# Altium footprint library Connectors.PcbLib: 228 footprints (part 9 of 15)
Each footprint in its own frame and in the unit in brackets; x right, y up, seen from the top. Pads: shape width x height; smd on the part's side, far side on the other; paste and mask are expansions set on the pad; w line width, h text height; cw(c..) or ccw(c..) is an arc to the next point about the centre after c.
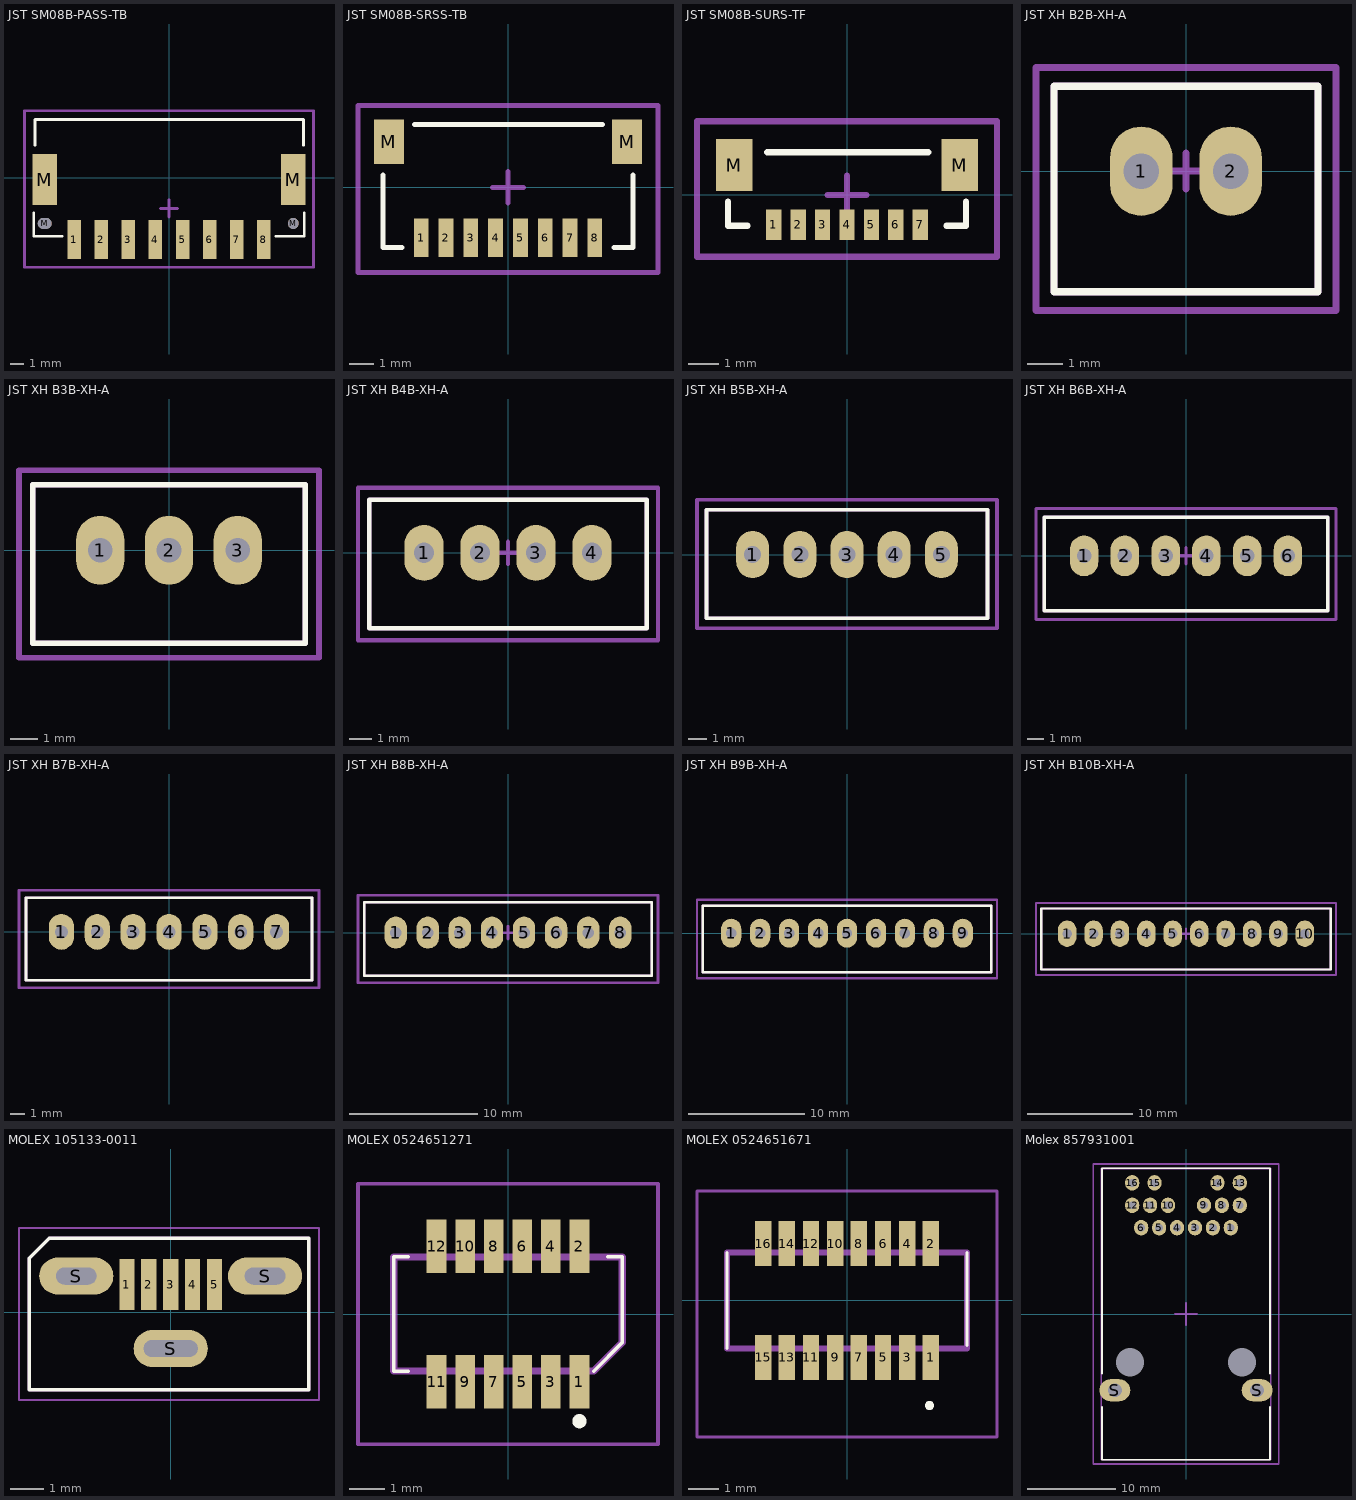
[diagram p8: the footprints below, top view; thin cyan lines are the x and y axes]

## JST SM08B-PASS-TB [mm] "JST PA Series 2mm pitch, side entry connector"
height 5.7
pads (12):
  rect 1x2.9 smd: 1(-7,-4.575) 2(-5,-4.575) 3(-3,-4.575) 4(-1,-4.575) 5(1,-4.575) 6(3,-4.575) 7(5,-4.575) 8(7,-4.575)
  oval 1x0.8 hole 0.8 slot 1 at 0 deg unplated mask+0.102: M(-9.2,-3.375)
  rect 1.8x3.8 smd: M(-9.2,-0.125) M(9.2,-0.125)
  round 0.8 hole 0.8 unplated mask+0.102: M(9.2,-3.375)
Top Overlay:
  lines w0.2: -10,-2.575 -10,-4.325 -7.905,-4.325 ; -9.921,2.41 -9.921,4.315 9.953,4.315 9.953,2.41 ; 7.905,-4.325 10,-4.325 10,-2.575
Top Courtyard:
  lines w0.2: -0.635,-2.265 0.635,-2.265 ; 0,-2.9 0,-1.63 ; -10.699,-6.607 -10.699,4.953 10.699,4.953 10.699,-6.607 -10.699,-6.607
3D body "JST SM08B-PASS-TB.STEP": height 5.8, standoff 0, extent -10,-5.641 10,4.359

## JST SM08B-SRSS-TB [mm] "1.0mm pitch/Disconnectable Crimp style connector"
height 2.95
pads (10):
  rect 0.6x1.55 smd: 1(-3.5,-2.032) 2(-2.5,-2.032) 3(-1.5,-2.032) 4(-0.5,-2.032) 5(0.5,-2.032) 6(1.5,-2.032) 7(2.5,-2.032) 8(3.5,-2.032)
  rect 1.2x1.8 smd: M(-4.8,1.843) M(4.8,1.843)
Top Overlay:
  lines w0.2: -5.032,0.508 -5.032,-2.413 -4.27,-2.413 ; -3.762,2.54 3.81,2.54 ; 4.27,-2.413 5.032,-2.413 5.032,0.508
Top Courtyard:
  lines w0.2: -0.635,0 0.635,0 ; 0,-0.635 0,0.635 ; -6.048,-3.429 6.048,-3.429 6.048,3.302 -6.048,3.302 -6.048,-3.429
3D body "JST SM08B-SRSS-TB.STEP": height 2.95, standoff -0.01, extent -5,-2.383 5,2.567

## JST SM08B-SURS-TF [mm] "1.0mm pitch/Disconnectable Crimp style connector"
height 2.95
pads (9):
  rect 0.5x1 smd: 1(-2.4,-0.975) 2(-1.6,-0.975) 3(-0.8,-0.975) 4(0,-0.975) 5(0.8,-0.975) 6(1.6,-0.975) 7(2.4,-0.975)
  rect 1.2x1.7 smd: M(-3.7,0.975) M(3.7,0.975)
Top Overlay:
  lines w0.2: -3.905,-0.213 -3.905,-1.016 -3.27,-1.016 ; -2.616,1.397 2.667,1.397 ; 3.27,-1.016 3.905,-1.016 3.905,-0.213
Top Courtyard:
  lines w0.2: -0.635,0 0.635,0 ; 0,-0.635 0,0.635 ; -4.921,-2.032 4.921,-2.032 4.921,2.413 -4.921,2.413 -4.921,-2.032
3D body "JST SM08B-SURS-TF.STEP": height 1.75, standoff 0, extent -4.3,-1.303 4.3,1.397

## JST XH B2B-XH-A [mm]
height 7
pads (2):
  oval 1.75x2.5 hole 1: 1(-1.25,0) 2(1.25,0)
Top Overlay:
  lines w0.2: -3.7,-3.375 -3.7,2.375 3.7,2.375 3.7,-3.375 -3.7,-3.375
Top Component Outline:
  lines w0.2: -3.7,-3.375 3.7,-3.375 3.7,2.375 -3.7,2.375 -3.7,-3.375
Top Courtyard:
  lines w0.2: -0.5,0 0.5,0 ; 0,-0.5 0,0.5 ; -4.2,-3.9 -4.2,2.9 4.2,2.9 4.2,-3.9 -4.2,-3.9
3D body "JST B2B-XH-A.STEP": height 7, standoff -3.4, extent -3.7,-3.375 3.7,2.375

## JST XH B3B-XH-A [mm]
height 7
pads (3):
  oval 1.75x2.5 hole 0.9: 1(-2.5,0) 2(0,0) 3(2.5,0)
Top Overlay:
  lines w0.2: -4.95,-3.375 4.95,-3.375 4.95,2.375 -4.95,2.375 -4.95,-3.375
Board:
  lines w0.2: -4.95,-3.375 -4.95,2.375 4.95,2.375 4.95,-3.375 -4.95,-3.375
Top Courtyard:
  lines w0.2: -0.5,0 0.5,0 ; 0,-0.5 0,0.5 ; -5.45,-3.9 5.45,-3.9 5.45,2.9 -5.45,2.9 -5.45,-3.9
3D body "JST B3B-XH-A.STEP": height 7, standoff -3.4, extent -4.95,-3.375 4.95,2.375

## JST XH B4B-XH-A [mm]
height 7
pads (4):
  oval 1.75x2.5 hole 0.9: 1(-3.75,0) 2(-1.25,0) 3(1.25,0) 4(3.75,0)
Top Overlay:
  lines w0.2: -6.2,-3.375 6.2,-3.375 6.2,2.375 -6.2,2.375 -6.2,-3.375
Board:
  lines w0.2: -6.2,-3.375 -6.2,2.375 6.2,2.375 6.2,-3.375 -6.2,-3.375
Top Courtyard:
  lines w0.2: -0.5,0 0.5,0 ; 0,-0.5 0,0.5 ; -6.7,-3.9 6.7,-3.9 6.7,2.9 -6.7,2.9 -6.7,-3.9
3D body "JST B4B-XH-A.STEP": height 7, standoff -3.4, extent -6.2,-3.375 6.2,2.375

## JST XH B5B-XH-A [mm]
height 7
pads (5):
  oval 1.75x2.5 hole 0.9: 1(-5,0) 2(-2.5,0) 3(0,0) 4(2.5,0) 5(5,0)
Top Overlay:
  lines w0.2: -7.45,-3.375 -7.45,2.375 7.45,2.375 7.45,-3.375 -7.45,-3.375
Board:
  lines w0.2: -7.45,-3.375 7.45,-3.375 7.45,2.375 -7.45,2.375 -7.45,-3.375
Top Courtyard:
  lines w0.2: -0.5,0 0.5,0 ; 0,-0.5 0,0.5 ; -7.95,-3.9 -7.95,2.9 7.95,2.9 7.95,-3.9 -7.95,-3.9
3D body "JST B5B-XH-A.STEP": height 7, standoff -3.4, extent -7.45,-3.375 7.45,2.375

## JST XH B6B-XH-A [mm]
height 7
pads (6):
  oval 1.75x2.5 hole 0.9: 1(-6.25,0) 2(-3.75,0) 3(-1.25,0) 4(1.25,0) 5(3.75,0) 6(6.25,0)
Top Overlay:
  lines w0.2: -8.7,-3.375 -8.7,2.375 8.7,2.375 8.7,-3.375 -8.7,-3.375
Board:
  lines w0.2: -8.7,-3.375 8.7,-3.375 8.7,2.375 -8.7,2.375 -8.7,-3.375
Top Courtyard:
  lines w0.2: -0.5,0 0.5,0 ; 0,-0.5 0,0.5 ; -9.2,-3.9 -9.2,2.9 9.2,2.9 9.2,-3.9 -9.2,-3.9
3D body "JST B6B-XH-A.STEP": height 7, standoff -3.4, extent -8.7,-3.375 8.7,2.375

## JST XH B7B-XH-A [mm]
height 7
pads (7):
  oval 1.75x2.5 hole 0.9: 1(-7.5,0) 2(-5,0) 3(-2.5,0) 4(0,0) 5(2.5,0) 6(5,0) 7(7.5,0)
Top Overlay:
  lines w0.2: -9.95,-3.375 -9.95,2.375 9.95,2.375 9.95,-3.375 -9.95,-3.375
Board:
  lines w0.2: -9.95,-3.375 9.95,-3.375 9.95,2.375 -9.95,2.375 -9.95,-3.375
Top Courtyard:
  lines w0.2: -0.5,0 0.5,0 ; 0,-0.5 0,0.5 ; -10.45,-3.9 -10.45,2.9 10.45,2.9 10.45,-3.9 -10.45,-3.9
3D body "JST B7B-XH-A.STEP": height 7, standoff -3.4, extent -9.95,-3.375 9.95,2.375

## JST XH B8B-XH-A [mm]
height 7
pads (8):
  oval 1.75x2.5 hole 0.9: 1(-8.75,0) 2(-6.25,0) 3(-3.75,0) 4(-1.25,0) 5(1.25,0) 6(3.75,0) 7(6.25,0) 8(8.75,0)
Top Overlay:
  lines w0.2: -11.2,-3.375 11.2,-3.375 11.2,2.375 -11.2,2.375 -11.2,-3.375
Board:
  lines w0.2: -11.2,-3.375 -11.2,2.375 11.2,2.375 11.2,-3.375 -11.2,-3.375
Top Courtyard:
  lines w0.2: -0.5,0 0.5,0 ; 0,-0.5 0,0.5 ; -11.7,-3.9 11.7,-3.9 11.7,2.9 -11.7,2.9 -11.7,-3.9
3D body "JST B8B-XH-A.STEP": height 7, standoff -3.4, extent -11.2,-3.375 11.2,2.375

## JST XH B9B-XH-A [mm]
height 7
pads (9):
  oval 1.75x2.5 hole 0.9: 1(-10,0) 2(-7.5,0) 3(-5,0) 4(-2.5,0) 5(0,0) 6(2.5,0) 7(5,0) 8(7.5,0) 9(10,0)
Top Overlay:
  lines w0.2: -12.45,-3.375 -12.45,2.375 12.45,2.375 12.45,-3.375 -12.45,-3.375
Board:
  lines w0.2: -12.45,-3.375 12.45,-3.375 12.45,2.375 -12.45,2.375 -12.45,-3.375
Top Courtyard:
  lines w0.2: -0.5,0 0.5,0 ; 0,-0.5 0,0.5 ; -12.95,-3.9 -12.95,2.9 12.95,2.9 12.95,-3.9 -12.95,-3.9
3D body "JST B9B-XH-A.STEP": height 7, standoff -3.4, extent -12.45,-3.375 12.45,2.375

## JST XH B10B-XH-A [mm]
height 7
pads (10):
  oval 1.75x2.5 hole 0.9: 1(-11.25,0) 2(-8.75,0) 3(-6.25,0) 4(-3.75,0) 5(-1.25,0) 6(1.25,0) 7(3.75,0) 8(6.25,0) 9(8.75,0) 10(11.25,0)
Top Overlay:
  lines w0.2: -13.7,-3.375 13.7,-3.375 13.7,2.375 -13.7,2.375 -13.7,-3.375
Board:
  lines w0.2: -13.7,-3.375 -13.7,2.375 13.7,2.375 13.7,-3.375 -13.7,-3.375
Top Courtyard:
  lines w0.2: -0.5,0 0.5,0 ; 0,-0.5 0,0.5 ; -14.2,-3.9 14.2,-3.9 14.2,2.9 -14.2,2.9 -14.2,-3.9
3D body "JST B10B-XH-A.STEP": height 7, standoff -3.4, extent -13.7,-3.375 13.7,2.375

## MOLEX 105133-0011 [mm]
pads (8):
  rect 0.45x1.5 smd: 1(-1.3,0.825) 2(-0.65,0.825) 3(0,0.825) 4(0.65,0.825) 5(1.3,0.825)
  oval 2.2x1.1 hole 0.5 slot 1.2 at 0 deg: S(-2.8,1.075) S(2.8,1.075)
  oval 2.2x1.1 hole 0.5 slot 1.6 at 0 deg: S(0,-1.075)
Top Overlay:
  lines w0.1: -4.2,-2.3 4.1,-2.3 4.1,2.2 -3.6,2.2 -4.2,1.6 -4.2,-2.3
Top Component Outline:
  lines w0.1: -4.2,-2.3 4.1,-2.3 4.1,2.2 -3.6,2.2 -4.2,1.6 -4.2,-2.3
Top Courtyard:
  lines w0.05: -4.5,-2.6 4.4,-2.6 4.4,2.5 -4.5,2.5 -4.5,-2.6
3D body "Molex 1051330011.stp": height 7.5, standoff -2.28, extent -4,-2.225 4,2.225

## MOLEX 0524651271 [mm]
height 3.55
pads (12):
  rect 0.55x1.5 smd: 1(2,-1.9) 2(2,1.9) 3(1.2,-1.9) 4(1.2,1.9) 5(0.4,-1.9) 6(0.4,1.9) 7(-0.4,-1.9) 8(-0.4,1.9) 9(-1.2,-1.9) 10(-1.2,1.9) 11(-2,-1.9) 12(-2,1.9)
Top Overlay:
  lines w0.1: -2.8,-1.6 -3.2,-1.6 -3.2,1.6 -2.8,1.6 ; 2.4,-1.6 3.2,-0.8 3.2,1.6 2.8,1.6
  lines w0.2: 1.9,-3 ccw(c2,-3) 2.1,-3 ccw(c2,-3) 1.9,-3
Top Component Outline:
  lines w0.2: -3.2,-1.6 -3.2,1.6 3.2,1.6 3.2,-0.8 2.4,-1.6 -3.2,-1.6
Top Courtyard:
  lines w0.1: -4.2,-3.65 4.2,-3.65 4.2,3.65 -4.2,3.65 -4.2,-3.65
3D body "524651271.stp": height 3.54, standoff -0.01, extent -3.2,-2.1 3.2,2.1

## MOLEX 0524651671 [mm]
height 3.55
pads (16):
  rect 0.55x1.5 smd: 1(2.8,-1.9) 2(2.8,1.9) 3(2,-1.9) 4(2,1.9) 5(1.2,-1.9) 6(1.2,1.9) 7(0.4,-1.9) 8(0.4,1.9) 9(-0.4,-1.9) 10(-0.4,1.9) 11(-1.2,-1.9) 12(-1.2,1.9) 13(-2,-1.9) 14(-2,1.9) 15(-2.8,-1.9) 16(-2.8,1.9)
Top Overlay:
  lines w0.1: -4,-1.6 -4,1.6 -4,-1.6 ; 4,-1.5 4,1.6 4,-1.5
  lines w0.2: 2.7,-3.5 ccw(c2.75,-3.5) 2.8,-3.5 ; 2.7,-3.5 cw(c2.75,-3.5) 2.8,-3.5 ; 2.7,-3.5 ccw(c2.75,-3.5) 2.8,-3.5
Top Component Outline:
  lines w0.2: -4,-1.6 4,-1.6 4,1.6 -4,1.6 -4,-1.6
Top Courtyard:
  lines w0.1: -5,-4.55 5,-4.55 5,3.65 -5,3.65 -5,-4.55
3D body "524651671.stp": height 3.54, standoff -0.01, extent -4,-2.1 4,2.1

## Molex 857931001 [mm]
height 15.05
pads (20):
  oval 1.6x1.75 hole 0.89: 1(5.075,9.78) 2(3.045,9.78) 3(1.015,9.78) 4(-1.015,9.78) 5(-3.045,9.78) 6(-5.075,9.78) 7(6.095,12.32) 8(4.065,12.32) 9(2.035,12.32) 10(-2.035,12.32) 11(-4.065,12.32) 12(-6.095,12.32) 13(6.095,14.86) 14(3.56,14.86) 15(-3.56,14.86) 16(-6.095,14.86)
  round 0 hole 3.2 unplated: M(-6.35,-5.46) M(6.35,-5.46)
  oval 3.5x2.5 hole 1.57: S(-8.065,-8.64) S(8.065,-8.64)
Top Overlay:
  lines w0.2: -9.525,-10.54 -9.525,-16.509 9.525,-16.509 9.525,-10.54 ; -9.525,-6.73 -9.525,16.511 9.525,16.511 9.525,-6.73
Top Component Outline:
  lines w0.2: -9.595,-16.509 9.595,-16.509 9.595,16.501 -9.595,16.501 -9.595,-16.509
Top Courtyard:
  lines w0.2: -1.27,0 1.27,0 ; 0,-1.27 0,1.27 ; -10.5,-17 10.5,-17 10.5,17 -10.5,17 -10.5,-17
3D body "Molex 857931020.STEP": height 15.05, standoff -3.7, extent -9.595,-16.509 9.595,16.501